# Altium schematic symbol library Regulator.SchLib: 250 symbols (part 3 of 6)
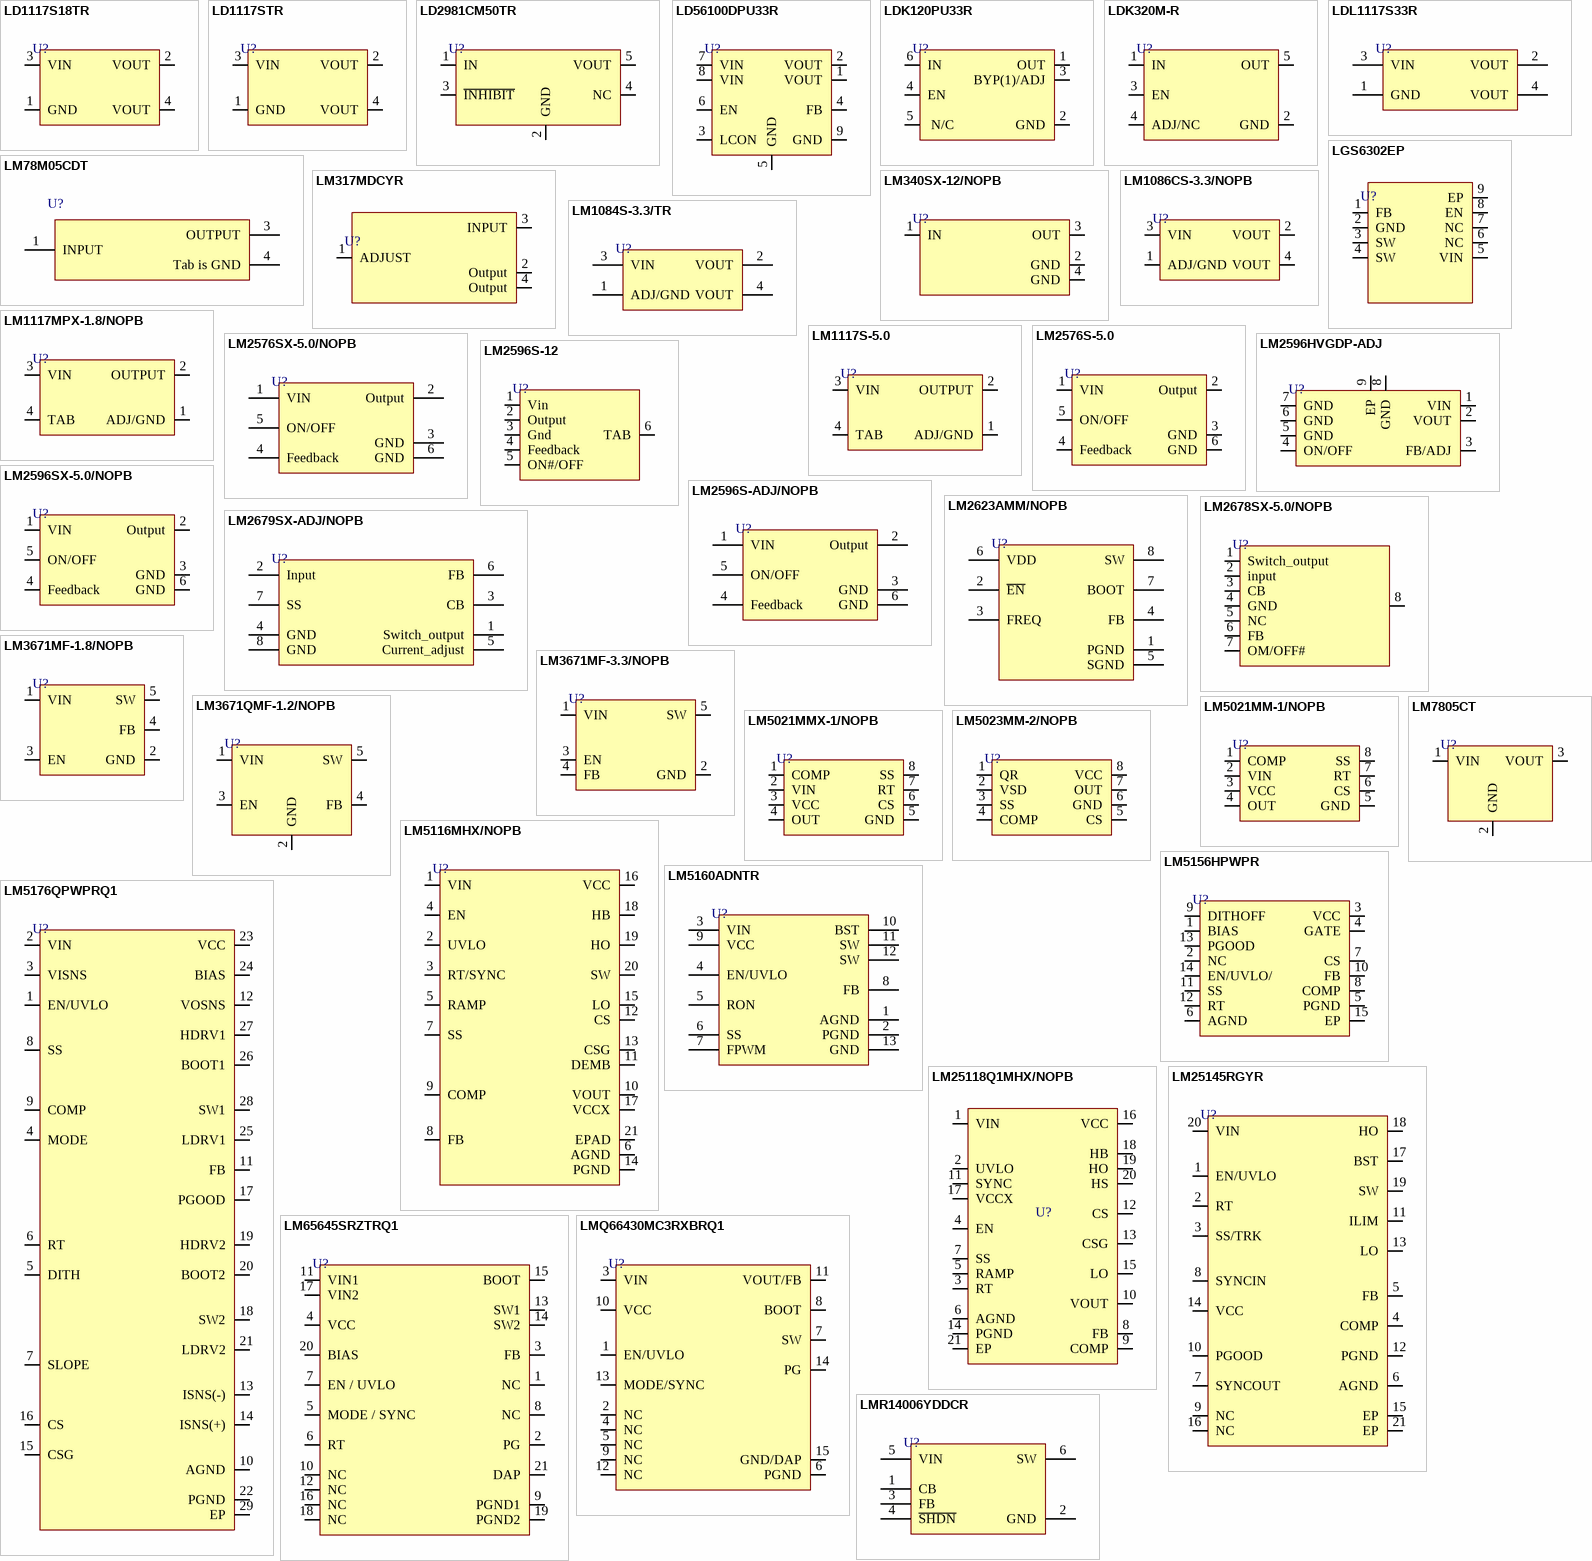
[diagram p8: symbols LD1117S18TR to LMR14006YDDCR]

## LMR14006YDDCR
designator U?
IC REG BUCK ADJ 600MA TSOT23-6; Manufacturer: Texas Instruments; Manufacturer Part Number: LMR14006YDDCR; Number of Outputs: 1; Min Input Voltage: 4V; Max Input Voltage: 40V; Switching Frequency: 2.415MHz; Quiescent Current: 28uA; Output Type: Fixed,Adjustable; Supplier 1: Mouser; RoHS: Yes; Category: Voltage Regulators - Switching; Pricing 1: 1=2.41000, 10=2.18000, 50=2.06000, 100=1.75000, 1000=1.20000, 10000=1.19000 (USD); Mount: Surface Mount; Case/Package: SOT-23-6; Number of Pins: 6; Weight: 0.00127oz; Min Operating Temperature: -40°C; Max Operating Temperature: 125°C; Packaging: Tape and Reel; Max Output Current: 600mA; Output Current: 600mA; Package Quantity: 3000; Operating Supply Voltage: 40V; Radiation Hardening: No; Lead Free: Lead Free; RoHS Compliant: Yes; ComponentLink1URL: https://datasheet.ciiva.com/29899/lmr14006-29899414.pdf?src-supplier=Avnet; ComponentLink1Description: https://datasheet.ciiva.com/29899/lmr14006-29899414.pdf?src-supplier=Avnet; LCSC Part Number: C477919; Item Type: IC; Supplier Part Number 1: 595-LMR14006YDDCR
footprint TSOP-6L
pins: 1 CB, 2 GND, 3 FB, 4 ~{SHDN}, 5 VIN, 6 SW

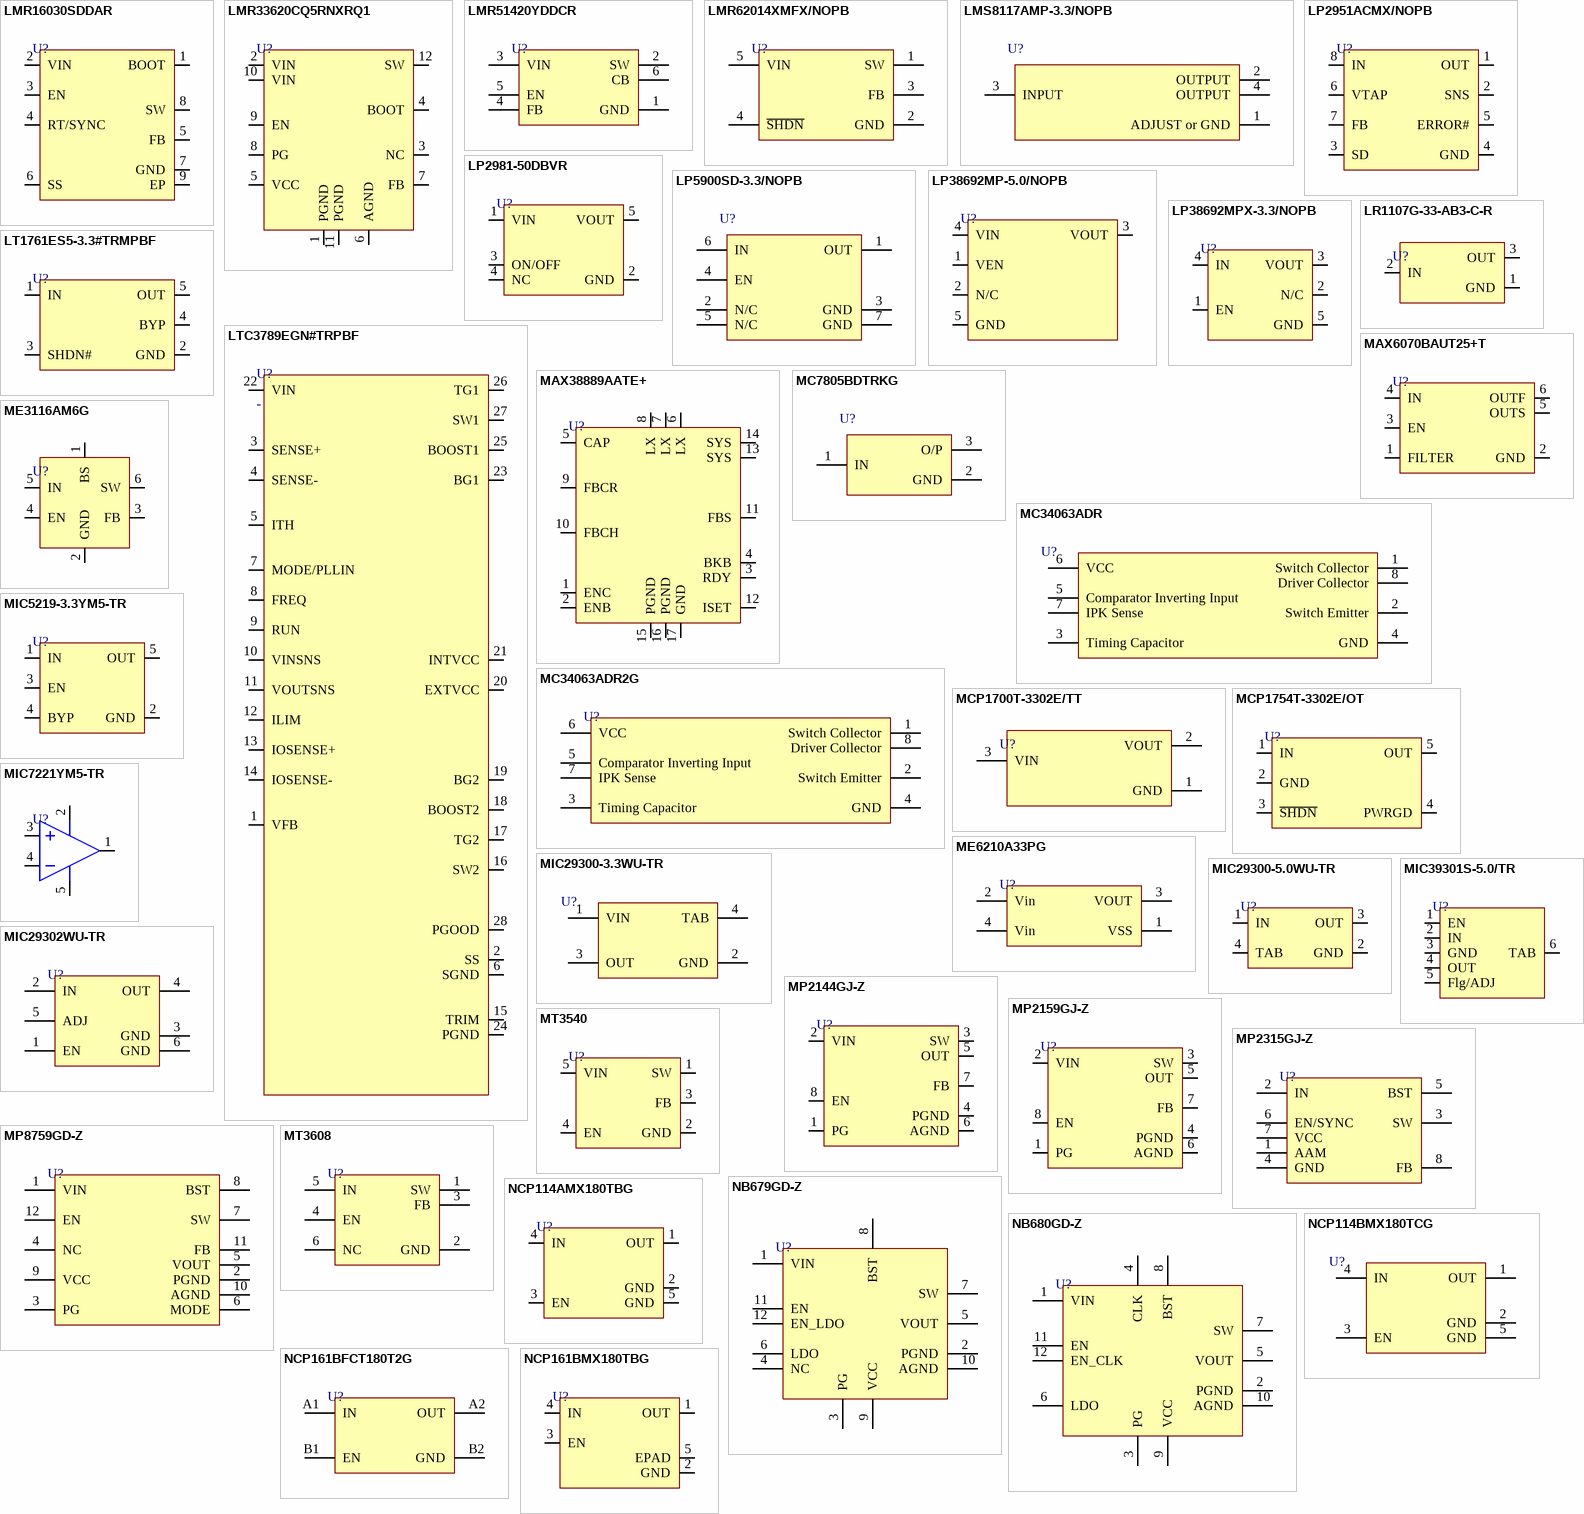
[diagram p2: symbols LMR16030SDDAR to NCP161BMX180TBG]

## LMR16030SDDAR
designator U?
IC REG BUCK ADJUSTABLE 3A 8SOPWR; Manufacturer: Texas Instruments; Manufacturer Part Number: LMR16030SDDAR; Quiescent Current: 40uA; Supplier 1: Digi-Key; RoHS: Yes; Category: Voltage Regulators - Switching; Stock 1: 10434; Pricing 1: 1=4.08000, 10=3.66300, 25=3.46320, 100=3.00130, 250=2.84736, 500=2.55494, 1000=2.17800 (USD); Number of Pins: 8; Min Operating Temperature: -40°C; Max Operating Temperature: 125°C; Lead Free: Lead Free; RoHS Compliant: Yes; ComponentLink1URL: http://www.ti.com/lit/ds/symlink/lmr16030.pdf?src-supplier=Digi-Key; ComponentLink1Description: http://www.ti.com/lit/ds/symlink/lmr16030.pdf?src-supplier=Digi-Key; ComponentLink2URL: http://www.ti.com/general/docs/suppproductinfo.tsp?distId=10&amp;gotoUrl=http%3A%2F%2Fwww.ti.com%2Flit%2Fgpn%2Flmr16030&src-supplier=Digi-Key; ComponentLink2Description: http://www.ti.com/general/docs/suppproductinfo.tsp?distId=10&amp;gotoUrl=http%3A%2F%2Fwww.ti.com%2Flit%2Fgpn%2Flmr16030&src-supplier=Digi-Key; Supplier Part Number 1: 296-47797-1-ND; LCSC Part Number: C136648; Item Type: IC
footprint 8-SO-EP_
pins: 1 BOOT, 2 VIN, 3 EN, 4 RT/SYNC, 5 FB, 6 SS, 7 GND, 8 SW, 9 EP

## LMR33620CQ5RNXRQ1
designator U?
IC REG BUCK 5V 2A 12VQFN; Manufacturer: Texas Instruments; Manufacturer Part Number: LMR33620CQ5RNXRQ1; Supplier: Digikey; Supplier Part Number: 296-53213-1-ND; RoHS: Yes; Category: Voltage Regulators - Switching; Stock: 5909; Pricing: 1=2.41, 10=2.163, 25=2.04, 100=1.7383, 250=1.63216, 500=1.42814, 1000=1.18332 (USD); ComponentLink1URL: http://www.ti.com/general/docs/suppproductinfo.tsp?distId=10&amp;gotoUrl=http%3A%2F%2Fwww.ti.com%2Flit%2Fgpn%2Flmr33620-q1&src-supplier=Digikey; ComponentLink1Description: http://www.ti.com/general/docs/suppproductinfo.tsp?distId=10&amp;gotoUrl=http%3A%2F%2Fwww.ti.com%2Flit%2Fgpn%2Flmr33620-q1&src-supplier=Digikey; Item Type: IC
footprint 12-VQFN-HR (3x2)
pins: 1 PGND, 2 VIN, 3 NC, 4 BOOT, 5 VCC, 6 AGND, 7 FB, 8 PG, 9 EN, 10 VIN, 11 PGND, 12 SW

## LMR51420YDDCR
designator U?
IC REG BUCK ADJ 2A SOT23-THIN; Manufacturer: Texas Instruments; Manufacturer Part Number: LMR51420YDDCR; Supplier 1: Mouser; RoHS: No; Category: Integrated Circuits (ICs); Stock 1: 6752; Pricing 1: 1=1.56, 10=1.41, 50=1.33, 100=1.13, 1000=0.77, 10000=0.769 (USD); LCSC Part Number: C5383002; Item Type: IC; Supplier Part Number 1: 595-LMR51420YDDCR; ComponentLink1Description: LCSC; ComponentLink1URL: https://www.lcsc.com/product-detail/DC-DC-Converters_Texas-Instruments-LMR51420YDDCR_C5383002.html
footprint SOT-23-6 THIN
pins: 1 GND, 2 SW, 3 VIN, 4 FB, 5 EN, 6 CB

## LMR62014XMFX/NOPB
designator U?
IC REG BOOST ADJ 1.8A SOT23-5; Manufacturer: TI National Semiconductor; Manufacturer Part Number: LMR62014XMFX/NOPB; Output Voltage: 20V; Min Input Voltage: 2.7V; Number of Outputs: 1; Max Output current: 1.4A; Max Supply Voltage: 14V; Min Output Voltage: 3V; Switching Frequency: 1.6MHz; Synchronous Rectifier: No; Quiescent Current: 2mA; Output Type: Adjustable; Output Configuration: Positive; Supplier 1: Mouser; RoHS: Yes; Category: Voltage Regulators - Switching; Stock 1: 7014; Pricing 1: 1=0.96000, 10=0.86100, 50=0.81700, 100=0.67100, 1000=0.43800, 10000=0.39800 (USD); Mounting Technology: Surface Mount; Case/Package: SOT-23-5; Pins: 5; Contact Plating: Tin,Matte; Min Operating Temperature: -40°C; Max Operating Temperature: 125°C; Output Current: 1.8A; Packaging: Tape and Reel; Package Quantity: 3000; Max Output Voltage: 20V; Topology: Boost; Series: SIMPLE SWITCHER®; Radiation Hardening: No; Lead Free: Lead Free; RoHS Compliant: Yes; ComponentLink1URL: http://www.ti.com/lit/ds/symlink/lmr62014.pdf?src-supplier=Farnell; ComponentLink1Description: http://www.ti.com/lit/ds/symlink/lmr62014.pdf?src-supplier=Farnell; ComponentLink2URL: http://www.ti.com/lit/ds/symlink/lmr62014.pdf?src-supplier=Digi-Key; ComponentLink2Description: http://www.ti.com/lit/ds/symlink/lmr62014.pdf?src-supplier=Digi-Key; ComponentLink3URL: http://www.ti.com/lit/gpn/lmr62014?src-supplier=Mouser; ComponentLink3Description: http://www.ti.com/lit/gpn/lmr62014?src-supplier=Mouser; ComponentLink4URL: http://www.ti.com/general/docs/lit/getliterature.tsp?genericPartNumber=LMR62014&&fileType=pdf&src-supplier=Avnet; ComponentLink4Description: http://www.ti.com/general/docs/lit/getliterature.tsp?genericPartNumber=LMR62014&&fileType=pdf&src-supplier=Avnet; ComponentLink5URL: http://components.arrow.com/part/dataview/56704644S382285N1317?src-supplier=Arrow+Electronics; ComponentLink5Description: http://components.arrow.com/part/dataview/56704644S382285N1317?src-supplier=Arrow+Electronics; Supplier Part Number 1: 926-LMR62014XMFXNOPB; LCSC Part Number: C468235; Item Type: IC
footprint SOT-23-5
pins: 1 SW, 2 GND, 3 FB, 4 ~{SHDN} , 5 VIN

## LMS8117AMP-3.3/NOPB
designator U?
IC REG LINEAR 3.3V 1A SOT223; Manufacturer: Texas Instruments; Manufacturer Part Number: LMS8117AMP-3.3/NOPB; Number of Outputs: 1; Min Input Voltage: 2.5V; Max Input Voltage: 15V; Polarity: Positive; Quiescent Current: 10mA; Accuracy: 1%; Output Type: Fixed; Dropout Voltage: 1.2V; Nominal Supply Current: 5mA; Supplier 1: Arrow Electronics; RoHS: Yes; Category: Voltage Regulators - Linear; Stock 1: 843; Pricing 1: 1=1.18760, 10=1.01800, 100=0.77540, 250=0.68460, 500=0.64870, 1000=0.59270 (USD); Mount: Surface Mount; Case/Package: SOT-223; Number of Pins: 4; Contact Plating: Tin,Matte; Min Operating Temperature: 0°C; Max Operating Temperature: 125°C; Output Voltage: 3.3V; Max Output Current: 1A; Packaging: Tape and Reel; Output Current: 1A; Nominal Output Voltage: 3.3V; Output Voltage Accuracy: 1%; Current Rating: 1A; Package Quantity: 1000; Length: 6.5mm; Width: 3.56mm; Height: 1.6mm; Radiation Hardening: No; REACH SVHC: No SVHC; Lead Free: Lead Free; RoHS Compliant: Yes; Supplier Part Number 1: LMS8117AMP-3.3/NOPB; LCSC Part Number: C201952; Item Type: IC; ComponentLink11Description: LCSC; ComponentLink11URL: https://www.lcsc.com/product-detail/Linear-Voltage-Regulators-LDO_Texas-Instruments-LMS8117AMP-3-3-NOPB_C201952.html
footprint SOT- 223
pins: 1 ADJUST or GND, 2 OUTPUT, 3 INPUT, 4 OUTPUT

## LP2951ACMX/NOPB
designator U?
IC REG LIN POS ADJ 100MA 8SOIC; Manufacturer: TI National Semiconductor; Manufacturer Part Number: LP2951ACMX/NOPB; Quiescent Current: 75uA; Max Supply Voltage: 30V; Min Supply Voltage: 2.3V; Supplier: Mouser; LCSC Part Number: C67596; RoHS: Yes; Item Type: IC; Stock: 19390; Pricing: 1=0.89, 10=0.732, 50=0.732, 100=0.542, 1000=0.369, 10000=0.308 (USD); Nominal Supply Current: 75uA; Length: 4.9mm; Width: 3.91mm; Height: 1.75mm; Thickness: 1.58mm; ComponentLink1URL: https://datasheet.ciiva.com/27052/1323645-27052000.pdf?src-supplier=Jameco; ComponentLink1Description: https://datasheet.ciiva.com/27052/1323645-27052000.pdf?src-supplier=Jameco; ComponentLink2URL: https://datasheet.ciiva.com/41458/001014279-da-01-en-ic-reg-ldo-ad-lp2951acmx-nopb-soic-8-tid-41458660.pdf?src-supplier=Conrad; ComponentLink2Description: https://datasheet.ciiva.com/41458/001014279-da-01-en-ic-reg-ldo-ad-lp2951acmx-nopb-soic-8-tid-41458660.pdf?src-supplier=Conrad; ComponentLink3URL: https://datasheet.ciiva.com/3223/lp2950-n-3223829.pdf?src-supplier=Avnet; ComponentLink3Description: https://datasheet.ciiva.com/3223/lp2950-n-3223829.pdf?src-supplier=Avnet; ComponentLink4URL: https://datasheet.ciiva.com/3223/lp2950-n-3223830.pdf?src-supplier=Avnet; ComponentLink4Description: https://datasheet.ciiva.com/3223/lp2950-n-3223830.pdf?src-supplier=Avnet; ComponentLink5URL: https://datasheet.ciiva.com/4886/lp2950-n-4886917.pdf?src-supplier=Mouser; ComponentLink5Description: https://datasheet.ciiva.com/4886/lp2950-n-4886917.pdf?src-supplier=Mouser; ComponentLink6URL: https://datasheet.ciiva.com/6597/lp2950-n-6597112.pdf?src-supplier=Digikey; ComponentLink6Description: https://datasheet.ciiva.com/6597/lp2950-n-6597112.pdf?src-supplier=Digikey; ComponentLink7URL: https://datasheet.ciiva.com/6597/lp2950-n-6597113.pdf?src-supplier=Digikey; ComponentLink7Description: https://datasheet.ciiva.com/6597/lp2950-n-6597113.pdf?src-supplier=Digikey; ComponentLink8URL: https://datasheet.ciiva.com/6597/lp2950-n-6597114.pdf?src-supplier=Digikey; ComponentLink8Description: https://datasheet.ciiva.com/6597/lp2950-n-6597114.pdf?src-supplier=Digikey
footprint SOIC-8
pins: 1 OUT, 2 SNS, 3 SD, 4 GND, 5 ERROR#, 6 VTAP, 7 FB, 8 IN

## LP2981-50DBVR
designator U?
IC REG LINEAR 5V 100MA SOT23-5; Manufacturer: Texas Instruments; Manufacturer Part Number: LP2981-50DBVR; Supplier: Mouser; LCSC Part Number: C2877856; RoHS: Yes; Item Type: IC; Stock: 14435; Pricing: 1=0.34, 10=0.274, 50=0.274, 100=0.203, 1000=0.138, 10000=0.137 (USD); ComponentLink1URL: https://datasheet.ciiva.com/2042/lp2981a-50-2042256.pdf?src-supplier=Digikey; ComponentLink1Description: https://datasheet.ciiva.com/2042/lp2981a-50-2042256.pdf?src-supplier=Digikey; ComponentLink2URL: https://datasheet.ciiva.com/41458/001014295-da-01-en-ic-reg-ldo-5v-0-lp2981-50dbvr-sot-5-tid-41458697.pdf?src-supplier=Conrad; ComponentLink2Description: https://datasheet.ciiva.com/41458/001014295-da-01-en-ic-reg-ldo-5v-0-lp2981-50dbvr-sot-5-tid-41458697.pdf?src-supplier=Conrad; ComponentLink3URL: https://datasheet.ciiva.com/3223/lp2981a-33-3223861.pdf?src-supplier=Avnet; ComponentLink3Description: https://datasheet.ciiva.com/3223/lp2981a-33-3223861.pdf?src-supplier=Avnet; ComponentLink4URL: https://datasheet.ciiva.com/2042/lp2981a-50-2042254.pdf?src-supplier=Digikey; ComponentLink4Description: https://datasheet.ciiva.com/2042/lp2981a-50-2042254.pdf?src-supplier=Digikey; ComponentLink5URL: https://datasheet.ciiva.com/2042/lp2981a-50-2042255.pdf?src-supplier=Digikey; ComponentLink5Description: https://datasheet.ciiva.com/2042/lp2981a-50-2042255.pdf?src-supplier=Digikey
footprint SOT-23-5
pins: 1 VIN, 2 GND, 3 ON/OFF, 4 NC, 5 VOUT

## LP5900SD-3.3/NOPB
designator U?
IC REG LINEAR 3.3V 150MA 6WSON; Manufacturer: Texas Instruments; Manufacturer Part Number: LP5900SD-3.3/NOPB; Package: WSON-6-EP(2x2); LCSC Part Number: C131975; Item Type: IC; ComponentLink1Description: LCSC; ComponentLink1URL: https://www.lcsc.com/product-detail/Linear-Voltage-Regulators-LDO_Texas-Instruments-LP5900SD-3-3-NOPB_C131975.html
footprint 6-WSON (2.2x2.5)
pins: 1 OUT, 2 N/C, 3 GND, 4 EN, 5 N/C, 6 IN, 7 GND

## LP38692MP-5.0/NOPB
designator U?
IC REG LINEAR 5V 1A SOT223-5; Manufacturer: Texas Instruments; Manufacturer Part Number: LP38692MP-5.0/NOPB; Item Type: LDO; Supplier: Mouser; Supplier Part Number: 926-38692MP-5.0/NOPB; RoHS: Yes; Stock: 1461; Pricing: 1=2.01, 10=1.71, 50=1.71, 100=1.45, 1000=0.91, 10000=0.888 (USD); Thickness: 1.6mm; ComponentLink1URL: https://datasheet.ciiva.com/6596/lp38690-6596184.pdf?src-supplier=Digikey; ComponentLink1Description: https://datasheet.ciiva.com/6596/lp38690-6596184.pdf?src-supplier=Digikey; ComponentLink2URL: https://datasheet.ciiva.com/6596/lp38690-6596185.pdf?src-supplier=Digikey; ComponentLink2Description: https://datasheet.ciiva.com/6596/lp38690-6596185.pdf?src-supplier=Digikey; ComponentLink3URL: https://datasheet.ciiva.com/6596/lp38690-6596186.pdf?src-supplier=Digikey; ComponentLink3Description: https://datasheet.ciiva.com/6596/lp38690-6596186.pdf?src-supplier=Digikey; ComponentLink4URL: https://datasheet.ciiva.com/14278/lp38692-14278796.pdf?src-supplier=Avnet; ComponentLink4Description: https://datasheet.ciiva.com/14278/lp38692-14278796.pdf?src-supplier=Avnet; ComponentLink5URL: https://datasheet.ciiva.com/22704/1854710-22704677.pdf?src-supplier=Element14; ComponentLink5Description: https://datasheet.ciiva.com/22704/1854710-22704677.pdf?src-supplier=Element14; LCSC Part Number: C28191
footprint SOT-223-5
pins: 1 VEN, 2 N/C, 3 VOUT, 4 VIN, 5 GND

## LP38692MPX-3.3/NOPB
designator U?
IC REG LINEAR 3.3V 1A SOT223-5; Manufacturer: TI National Semiconductor; Manufacturer Part Number: LP38692MPX-3.3/NOPB; Max Supply Voltage: 10V; Dropout Voltage: 650mV; Number of Regulators: 1; Quiescent Current: 55uA; Output Type: Fixed; Output Configuration: Positive; Max Supply Current: 100uA; Power Supply Rejection Ratio (PSRR): 55dB; Supplier: Mouser; Supplier Part Number: 926-LP38692MPX33NOPB; RoHS: Yes; Item Type: IC; Stock: 1537; Pricing: 1=1.46, 10=1.12, 50=1.12, 100=0.99, 1000=0.795, 10000=0.736 (USD); Mounting Technology: Surface Mount; Case/Package: TO-261-5; Pins: 5; Min Operating Temperature: -40°C; Max Operating Temperature: 125°C; Output Voltage: 3.3V; Output Current: 1A; Packaging: Cut Tape; Series: -; Min Output Voltage: 3.3V; Lead Free: Lead Free; RoHS Compliant: Yes; ComponentLink1URL: https://datasheet.ciiva.com/6583/lp38690-6583575.pdf?src-supplier=Digikey; ComponentLink1Description: https://datasheet.ciiva.com/6583/lp38690-6583575.pdf?src-supplier=Digikey
footprint SOT-223-5
pins: 1 EN, 2 N/C, 3 VOUT, 4 IN, 5 GND

## LR1107G-33-AB3-C-R
designator U?
600mA 60dB Fixed 3.3V Positive electrode 7V SOT-89-3 Voltage Regulators - Linear, Low Drop Out (LDO) Regulators ROHS; Manufacturer: UTC; Manufacturer Part Number: LR1107G-33-AB3-C-R; Item Type: IC; Package: SOT-89-3; LCSC Part Number: C171498; ComponentLink1Description: LCSC; ComponentLink1URL: https://www.lcsc.com/product-detail/Linear-Voltage-Regulators-LDO_UTC-Unisonic-Tech-LR1107G-33-AB3-C-R_C171498.html
footprint SOT-89-3
pins: 1 GND, 2 IN, 3 OUT

## LT1761ES5-3.3#TRMPBF
designator U?
IC REG LDO 3.3V 0.1A TSOT23-5; Manufacturer: Analog Devices / Linear Technology; Manufacturer Part Number: LT1761ES5-3.3#TRMPBF; Number of Channels: 1NUMBER; Supplier: Mouser; LCSC Part Number: C655159; RoHS: Yes; Item Type: IC; Stock: 4291; Pricing: 1=4.03, 10=2.79, 50=2.79, 100=2.32, 1000=1.77, 10000=1.67 (USD); ComponentLink1URL: https://datasheet.ciiva.com/29306/157633-da-01-en-ic-lt-1761-es5-3-3-l-d-reg-sot-23-5-29306613.pdf?src-supplier=Conrad; ComponentLink1Description: https://datasheet.ciiva.com/29306/157633-da-01-en-ic-lt-1761-es5-3-3-l-d-reg-sot-23-5-29306613.pdf?src-supplier=Conrad; ComponentLink2URL: https://datasheet.ciiva.com/2041/2732-2041141.pdf?src-supplier=Digikey; ComponentLink2Description: https://datasheet.ciiva.com/2041/2732-2041141.pdf?src-supplier=Digikey; ComponentLink3URL: https://datasheet.ciiva.com/2041/2732-2041142.pdf?src-supplier=Digikey; ComponentLink3Description: https://datasheet.ciiva.com/2041/2732-2041142.pdf?src-supplier=Digikey; ComponentLink4URL: https://datasheet.ciiva.com/2041/2732-2041143.pdf?src-supplier=Digikey; ComponentLink4Description: https://datasheet.ciiva.com/2041/2732-2041143.pdf?src-supplier=Digikey; ComponentLink5URL: https://datasheet.ciiva.com/8041/1563033-8041753.pdf?src-supplier=Element14; ComponentLink5Description: https://datasheet.ciiva.com/8041/1563033-8041753.pdf?src-supplier=Element14
footprint TSOT-23-5
pins: 1 IN, 2 GND, 3 SHDN#, 4 BYP, 5 OUT

## LTC3789EGN#TRPBF
designator U?, comment -
IC REG CTRLR BUCK-BOOST 28SSOP; Manufacturer: Analog Devices / Linear Technology; Manufacturer Part Number: LTC3789EGN#TRPBF; Supplier: Mouser; Supplier Part Number: 584-LTC3789EGN#TRPBF; RoHS: Yes; Category: Voltage Regulators - Switching; Stock: 782; Pricing: 1=11.87, 10=10.91, 50=10.46, 100=9.21, 1000=7.52, 10000=7.23 (USD); ComponentLink1URL: https://datasheet.ciiva.com/2019/30095-2019043.pdf?src-supplier=Digikey; ComponentLink1Description: https://datasheet.ciiva.com/2019/30095-2019043.pdf?src-supplier=Digikey; Item Type: IC
footprint 28-SSOP
pins: 1 VFB, 2 SS, 3 SENSE+, 4 SENSE-, 5 ITH, 6 SGND, 7 MODE/PLLIN, 8 FREQ, 9 RUN, 10 VINSNS, 11 VOUTSNS, 12 ILIM, 13 IOSENSE+, 14 IOSENSE-, 15 TRIM, 16 SW2, 17 TG2, 18 BOOST2, 19 BG2, 20 EXTVCC, 21 INTVCC, 22 VIN, 23 BG1, 24 PGND, 25 BOOST1, 26 TG1, 27 SW1, 28 PGOOD

## MAX6070BAUT25+T
designator U?
IC VREF SERIES 0.08% SOT23-6; Manufacturer: Analog Devices; Manufacturer Part Number: MAX6070BAUT25+T; Output Type: 6317OutputType; Reference Type: 6142ReferenceType; Max Supply Voltage: 5.5V; Max Output current: 10mA; Min Input Voltage: 2.7V; Min Output Voltage: 2.5V; Number of Channels: 1NUMBER; Operating Supply Current: 300uA; Quiescent Current: 235uA; Supplier: Mouser; LCSC Part Number: C143531; RoHS: No; Item Type: IC; Stock: 5392; Pricing: 1=3.56, 10=2.63, 50=2.63, 100=2.19, 1000=1.72, 10000=1.53 (USD); Mounting Technology: 8Mount; Case/Package: 942Case; Pins: 6NUMBER; Min Operating Temperature: -40°C; Max Operating Temperature: 125°C; Tolerance: 0.08%; Output Current: 10mA; Output Voltage: 2.5V; Radiation Hardening: 5898YesNo; ComponentLink1URL: https://datasheet.octopart.com/MAX6070BAUT25%2BT-Analog-Devices-datasheet-134530559.pdf?src-supplier=LKR; ComponentLink1Description: https://datasheet.octopart.com/MAX6070BAUT25%2BT-Analog-Devices-datasheet-134530559.pdf?src-supplier=LKR
footprint SOT-23-6
pins: 1 FILTER, 2 GND, 3 EN, 4 IN, 5 OUTS, 6 OUTF

## MAX38889AATE+
designator U?
IC REG BUCK-BOOST ADJ 3A 16TQFN; Manufacturer: Analog Devices; Manufacturer Part Number: MAX38889AATE+; Supplier: Mouser; Supplier Part Number: 700-MAX38889AATE+; RoHS: No; Category: Voltage Regulators - Switching; Stock: 2896; Pricing: 1=6.25, 10=5.65, 50=4.68, 100=4.47, 1000=3.7, 10000=3.7 (USD); Item Type: IC
footprint 16-QFN (3x3).
pins: 1 ENC, 2 ENB, 3 RDY, 4 BKB, 5 CAP, 6 LX, 7 LX, 8 LX, 9 FBCR, 10 FBCH, 11 FBS, 12 ISET, 13 SYS, 14 SYS, 15 PGND, 16 PGND, 17 GND

## MC7805BDTRKG
designator U?
IC REG LINEAR 5V 1A DPAK; Manufacturer: onsemi; Manufacturer Part Number: MC7805BDTRKG; Item Type: Regulator; Package: TO-252-2(DPAK); LCSC Part Number: C110908; ComponentLink1Description: LCSC; ComponentLink1URL: https://www.lcsc.com/product-detail/Linear-Voltage-Regulators-LDO_onsemi-MC7805BDTRKG_C110908.html
footprint DPAK_
pins: 1 IN, 2 GND, 3 O/P

## MC34063ADR
designator U?
IC REG BUCK BST ADJ 1.5A 8SOIC; Manufacturer: Texas Instruments; Manufacturer Part Number: MC34063ADR; Output Voltage: 40V; Number of Outputs: 1; Switching Frequency: 100kHz; Synchronous Rectifier: No; Output Type: Adjustable; Max Output Current: 750mA; Min Input Voltage: 3V; Min Output Voltage: 1.55V; Quiescent Current: 4mA; Topology: Flyback,SEPIC; Supplier 1: Digi-Key; RoHS: Yes; Category: Power Supply Modules; Stock 1: 17204; Pricing 1: 1=0.78000, 10=0.68400, 25=0.64240, 100=0.52420, 250=0.48688, 500=0.41438, 1000=0.34206 (USD); Case/Package: D; Number of Pins: 8; Weight: 0.002561oz; Contact Plating: Gold; Min Operating Temperature: 0°C; Max Operating Temperature: 70°C; Output Current: 1.5A; Packaging: Tape and Reel; Package Quantity: 1; Max Input Voltage: 40V; Max Output Voltage: 40V; Termination: SMD/SMT; Radiation Hardening: No; RoHS Compliant: Yes; Lead Free: Lead Free; REACH SVHC: No SVHC; ComponentLink1URL: https://datasheet.ciiva.com/7408/1862376-7408060.pdf?src-supplier=Newark; ComponentLink1Description: https://datasheet.ciiva.com/7408/1862376-7408060.pdf?src-supplier=Newark; ComponentLink2URL: https://datasheet.ciiva.com/2025/mc33063a-2025162.pdf?src-supplier=Digi-Key; ComponentLink2Description: https://datasheet.ciiva.com/2025/mc33063a-2025162.pdf?src-supplier=Digi-Key; ComponentLink3URL: https://datasheet.ciiva.com/2025/mc33063a-2025161.pdf?src-supplier=Digi-Key; ComponentLink3Description: https://datasheet.ciiva.com/2025/mc33063a-2025161.pdf?src-supplier=Digi-Key; ComponentLink4URL: https://datasheet.ciiva.com/2025/mc33063a-2025163.pdf?src-supplier=Digi-Key; ComponentLink4Description: https://datasheet.ciiva.com/2025/mc33063a-2025163.pdf?src-supplier=Digi-Key; Supplier Part Number 1: 296-17765-1-ND; LCSC Part Number: C100023; Item Type: IC
footprint SOIC-8
pins: 1 Switch Collector, 2 Switch Emitter, 3 Timing Capacitor, 4 GND, 5 Comparator Inverting Input, 6 VCC, 7 IPK Sense, 8 Driver Collector

## MC34063ADR2G
designator U?
IC REG BUCK BOOST INV ADJ 8SOIC; Manufacturer: ON Semiconductor; Manufacturer Part Number: MC34063ADR2G; Number of Outputs: 1; Output Voltage: 40V; Max Output Current: 1.5A; Min Input Voltage: 3V; Switching Frequency: 100kHz; Synchronous Rectifier: No; Min Output Voltage: 1.25V; Output Type: Adjustable; Supplier 1: Arrow Electronics; RoHS: Yes; Category: Voltage Regulators - Switching; Stock 1: 2000; Pricing 1: 1=0.59300, 10=0.47930, 25=0.47460, 100=0.29030, 250=0.28740, 500=0.28460, 1000=0.25300, 3000=0.22150 (USD); Mount: Surface Mount; Case/Package: SOIC; Number of Pins: 8; Contact Plating: Tin,Matte; Min Operating Temperature: 0°C; Max Operating Temperature: 70°C; Package Quantity: 1; Packaging: Tape and Reel; Output Current: 1.5A; Max Input Voltage: 40V; Max Output Voltage: 40V; Series: -; Switching Frequency-Max: 100kHz; Length: 5mm; Width: 4mm; Height: 1.5mm; Radiation Hardening: No; REACH SVHC: No SVHC; Lead Free: Lead Free; Halogen Free: Halogen Free; RoHS Compliant: Yes; ComponentLink1URL: https://datasheet.ciiva.com/34301/871666-34301629.pdf?src-supplier=Jameco; ComponentLink1Description: https://datasheet.ciiva.com/34301/871666-34301629.pdf?src-supplier=Jameco; ComponentLink2URL: https://datasheet.ciiva.com/15112/getdatasheetpartid-59933-15112667.pdf?src-supplier=Verical; ComponentLink2Description: https://datasheet.ciiva.com/15112/getdatasheetpartid-59933-15112667.pdf?src-supplier=Verical; ComponentLink3URL: https://datasheet.ciiva.com/2025/mc34063a-d-2025168.pdf?src-supplier=Digi-Key; ComponentLink3Description: https://datasheet.ciiva.com/2025/mc34063a-d-2025168.pdf?src-supplier=Digi-Key; ComponentLink4URL: https://datasheet.ciiva.com/3217/mc34063a-d-3217624.pdf?src-supplier=Avnet; ComponentLink4Description: https://datasheet.ciiva.com/3217/mc34063a-d-3217624.pdf?src-supplier=Avnet; ComponentLink5URL: https://datasheet.ciiva.com/3217/mc34063a-d-3217493.pdf?src-supplier=Avnet; ComponentLink5Description: https://datasheet.ciiva.com/3217/mc34063a-d-3217493.pdf?src-supplier=Avnet; ComponentLink6URL: https://datasheet.ciiva.com/2025/mc34063a-d-2025169.pdf?src-supplier=Digi-Key; ComponentLink6Description: https://datasheet.ciiva.com/2025/mc34063a-d-2025169.pdf?src-supplier=Digi-Key; ComponentLink7URL: https://datasheet.ciiva.com/2025/mc34063a-d-2025167.pdf?src-supplier=Digi-Key; ComponentLink7Description: https://datasheet.ciiva.com/2025/mc34063a-d-2025167.pdf?src-supplier=Digi-Key; Supplier Part Number 1: MC34063ADR2G; Item Type: IC
footprint SOIC-8
pins: 1 Switch Collector, 2 Switch Emitter, 3 Timing Capacitor, 4 GND, 5 Comparator Inverting Input, 6 VCC, 7 IPK Sense, 8 Driver Collector

## MCP1700T-3302E/TT
designator U?
IC REG LDO 3.3V 0.25A SOT23-3; Manufacturer: Microchip; Manufacturer Part Number: MCP1700T-3302E/TT; Number of Outputs: 1; Min Input Voltage: 2.3V; Max Input Voltage: 6V; Dropout Voltage: 178mV; Output Current: 250mA; Max Power Dissipation: 369.6mW; Input Bias Current: 1.6uA; Polarity: Positive; Quiescent Current: 4uA; Accuracy: 2%; Output Type: Fixed; Supplier 1: Digi-Key; RoHS: Yes; Category: Voltage Regulators - Linear; Stock 1: 230029; Pricing 1: 1=0.50000, 25=0.42400, 100=0.37500 (USD); Mount: Surface Mount; Case/Package: SOT-23; Number of Pins: 3; Contact Plating: Tin,Matte; Min Operating Temperature: -40°C; Max Operating Temperature: 125°C; Nominal Output Voltage: 3.3V; Packaging: Tape and Reel; Output Voltage: 3.3V; Max Output Current: 250mA; Max Supply Voltage: 6V; Min Supply Voltage: 2.3V; Package Quantity: 3000; Min Output Voltage: 3.3V; Max Output Voltage: 3.3V; Termination: SMD/SMT; Output Voltage Accuracy: 2%; Nominal Supply Current: 4uA; Power Dissipation: 369.6mW; Supply Current: 4uA; Length: 2.9mm; Width: 1.3mm; Height: 0.95mm; Radiation Hardening: No; Reach SVHC Compliant: No SVHC; Lead Free: Lead Free; RoHS Compliant: Yes; ComponentLink1URL: https://datasheet.ciiva.com/5801/1784514-5801824.pdf?src-supplier=Farnell; ComponentLink1Description: https://datasheet.ciiva.com/5801/1784514-5801824.pdf?src-supplier=Farnell; ComponentLink2URL: https://datasheet.ciiva.com/2040/21826b-2040112.pdf?src-supplier=Digi-Key; ComponentLink2Description: https://datasheet.ciiva.com/2040/21826b-2040112.pdf?src-supplier=Digi-Key; ComponentLink3URL: https://datasheet.ciiva.com/7649/1784514-7649813.pdf?src-supplier=Element14; ComponentLink3Description: https://datasheet.ciiva.com/7649/1784514-7649813.pdf?src-supplier=Element14; ComponentLink4URL: https://datasheet.ciiva.com/22710/1784514-22710988.pdf?src-supplier=Element14; ComponentLink4Description: https://datasheet.ciiva.com/22710/1784514-22710988.pdf?src-supplier=Element14; ComponentLink5URL: https://datasheet.ciiva.com/14150/mcp1700-eng-tds-14150122.pdf?src-supplier=Distrelec; ComponentLink5Description: https://datasheet.ciiva.com/14150/mcp1700-eng-tds-14150122.pdf?src-supplier=Distrelec; ComponentLink6URL: https://datasheet.ciiva.com/8041/1784514-8041598.pdf?src-supplier=Element14; ComponentLink6Description: https://datasheet.ciiva.com/8041/1784514-8041598.pdf?src-supplier=Element14; ComponentLink7URL: https://datasheet.ciiva.com/3224/jp011779-3224133.pdf?src-supplier=Avnet; ComponentLink7Description: https://datasheet.ciiva.com/3224/jp011779-3224133.pdf?src-supplier=Avnet; ComponentLink8URL: https://datasheet.ciiva.com/16208/filehandler-aspxddocname-en011779-16208911.pdf?src-supplier=Future+Electronics; ComponentLink8Description: https://datasheet.ciiva.com/16208/filehandler-aspxddocname-en011779-16208911.pdf?src-supplier=Future+Electronics; ComponentLink9URL: https://datasheet.ciiva.com/15200/getdatasheetpartid-453599-15200229.pdf?src-supplier=Verical; ComponentLink9Description: https://datasheet.ciiva.com/15200/getdatasheetpartid-453599-15200229.pdf?src-supplier=Verical; ComponentLink10URL: https://datasheet.ciiva.com/2040/21826b-2040113.pdf?src-supplier=Digi-Key; ComponentLink10Description: https://datasheet.ciiva.com/2040/21826b-2040113.pdf?src-supplier=Digi-Key; ComponentLink11URL: https://datasheet.ciiva.com/2040/21826b-2040114.pdf?src-supplier=Digi-Key; ComponentLink11Description: https://datasheet.ciiva.com/2040/21826b-2040114.pdf?src-supplier=Digi-Key; ComponentLink12URL: https://datasheet.ciiva.com/29305/651414-da-01-en-ic-reg-ld-mcp1700t-3302e-tt-sot-23-3-mcp-29305258.pdf?src-supplier=Conrad; ComponentLink12Description: https://datasheet.ciiva.com/29305/651414-da-01-en-ic-reg-ld-mcp1700t-3302e-tt-sot-23-3-mcp-29305258.pdf?src-supplier=Conrad; Supplier Part Number 1: MCP1700T3302ETTCT-ND; Item Type: IC
footprint SOT-23 (TRANS NPN 40V 0.6A SOT23)
pins: 1 GND, 2 VOUT, 3 VIN

## MCP1754T-3302E/OT
designator U?
IC REG LINEAR 3.3V 150MA SOT23-5; Manufacturer: Microchip; Manufacturer Part Number: MCP1754T-3302E/OT; Max Supply Voltage: 16V; Number of Regulators: 1; Quiescent Current: 90uA; Output Type: Fixed; Output Configuration: Positive; Max Supply Current: 250uA; Power Supply Rejection Ratio (PSRR): 72dB; Dropout Voltage: 300mV; Min Input Voltage: 3.6V; Accuracy: 2%; Supplier: Arrow Electronics; LCSC Part Number: C295712; RoHS: Yes; Item Type: IC; Stock: 5987; Pricing: 1=0.5022, 10=0.4946, 25=0.487, 100=0.4793, 250=0.4717, 500=0.4641, 1000=0.4565, 3000=0.4488 (USD); Case/Package: SOT-23-5; Pins: 5; Min Operating Temperature: -40°C; Max Operating Temperature: 150°C; Packaging: Tape and Reel; Output Current: 150mA; Series: -; Min Output Voltage: 3.3V; Output Voltage: 3.3V; Number of Outputs: 1; Max Output current: 150mA; Polarity: Positive; Radiation Hardening: No; Lead Free: Lead Free; RoHS Compliant: Yes; ComponentLink1URL: https://datasheet.ciiva.com/26947/getdatasheetpartid-769851-26947956.pdf?src-supplier=Verical; ComponentLink1Description: https://datasheet.ciiva.com/26947/getdatasheetpartid-769851-26947956.pdf?src-supplier=Verical; ComponentLink2URL: https://datasheet.ciiva.com/13012/22276a-79238-13012583.pdf?src-supplier=Mouser; ComponentLink2Description: https://datasheet.ciiva.com/13012/22276a-79238-13012583.pdf?src-supplier=Mouser; ComponentLink3URL: https://datasheet.ciiva.com/8238/22276a-8238678.pdf?src-supplier=Avnet; ComponentLink3Description: https://datasheet.ciiva.com/8238/22276a-8238678.pdf?src-supplier=Avnet; ComponentLink4URL: https://datasheet.ciiva.com/2056/22276a-2056672.pdf?src-supplier=Digikey; ComponentLink4Description: https://datasheet.ciiva.com/2056/22276a-2056672.pdf?src-supplier=Digikey
footprint SOT-23-5
pins: 1 IN, 2 GND, 3 ~{SHDN}, 4 PWRGD, 5 OUT

## ME3116AM6G
designator U?
Step-down type SOT-23-6 DC-DC Converters ROHS; Manufacturer: MICRONE; Manufacturer Part Number: ME3116AM6G; Item Type: IC; Package: SOT-23-6; LCSC Part Number: C97643; ComponentLink1Description: LCSC; ComponentLink1URL: https://www.lcsc.com/product-detail/DC-DC-Converters_MICRONE-Nanjing-Micro-One-Elec-ME3116AM6G_C97643.html
footprint SOT-23-6
pins: 1 BS, 2 GND, 3 FB, 4 EN, 5 IN, 6 SW

## ME6210A33PG
designator U?
500mA 260mV@(200mA) Fixed 3.3V~3.3V Positive 1 18V SOT-89 Linear Voltage Regulators (LDO) ROHS; Manufacturer: MICRONE; Manufacturer Part Number: ME6210A33PG; Item Type: IC; Package: SOT-89; LCSC Part Number: C85233; ComponentLink1Description: LCSC; ComponentLink1URL: https://www.lcsc.com/product-detail/Linear-Voltage-Regulators-LDO_MICRONE-Nanjing-Micro-One-Elec-ME6210A33PG_C85233.html
footprint SOT-89
pins: 1 VSS, 2 Vin, 3 VOUT, 4 Vin

## MIC5219-3.3YM5-TR
designator U?
IC REG LINEAR 3.3V 500MA SOT23-5; Manufacturer: Microchip; Manufacturer Part Number: MIC5219-3.3YM5-TR; Max Supply Voltage: 12V; Min Supply Voltage: 2.5V; Number of Channels: 1NUMBER; Supplier: Digikey; LCSC Part Number: C29613; RoHS: Yes; Item Type: IC; Stock: 92321; Pricing: 1=1.19, 25=1, 100=0.9 (USD); Lead Free: 5697LeadFree; ComponentLink1URL: https://datasheet.ciiva.com/15111/getdatasheetpartid-82344-15111461.pdf?src-supplier=Verical; ComponentLink1Description: https://datasheet.ciiva.com/15111/getdatasheetpartid-82344-15111461.pdf?src-supplier=Verical; ComponentLink2URL: https://datasheet.ciiva.com/16208/mic5219-16208920.pdf?src-supplier=Future+Electronics; ComponentLink2Description: https://datasheet.ciiva.com/16208/mic5219-16208920.pdf?src-supplier=Future+Electronics
footprint SOT-23-5
pins: 1 IN, 2 GND, 3 EN, 4 BYP, 5 OUT

## MIC7221YM5-TR
designator U?
IC COMPARATOR 1 GEN PUR SOT23-5; Manufacturer: Microchip; Manufacturer Part Number: MIC7221YM5-TR; Item Type: Comparators; Supplier: Digikey; Supplier Part Number: 576-2901-1-ND; RoHS: Yes; Stock: 26283; Pricing: 1=0.37, 25=0.32, 100=0.3 (USD)
footprint SOT-23-5
pins: 1 OUT, 2 V+ (power), 3 IN+, 4 IN-, 5 V- (power)

## MIC29300-3.3WU-TR
designator U?
IC REG LINEAR 3.3V 3A TO263-3; Manufacturer: Microchip; Manufacturer Part Number: MIC29300-3.3WU-TR; Dropout Voltage: 370mV; Number of Regulators: 1; Supplier 1: Digi-Key; Stock 1: 1; Pricing 1: 1=3.65, 25=3.05, 100=2.77 (USD); Mount: Surface Mount; Case/Package: TO-263-4; Min Operating Temperature: -40°C; Max Operating Temperature: 125°C; Packaging: Tape and Reel; Output Voltage: 3.3V; Output Current: 3A; Lead Free: Lead Free; ComponentLink1URL: http://www.micrel.com/_PDF/mic29150.pdf?src-supplier=Future+Electronics; ComponentLink1Description: http://www.micrel.com/_PDF/mic29150.pdf?src-supplier=Future+Electronics; ComponentLink2URL: http://www.micrel.com/_PDF/mic29150.pdf?src-supplier=Digi-Key; ComponentLink2Description: http://www.micrel.com/_PDF/mic29150.pdf?src-supplier=Digi-Key; Supplier Part Number 1: MIC29300-3.3WU-CT-ND; LCSC Part Number: C481370; Item Type: IC
footprint TO263-3_
pins: 1 VIN, 2 GND, 3 OUT, 4 TAB

## MIC29300-5.0WU-TR
designator U?
IC REG LINEAR 5V 3A TO263-3; Manufacturer: Microchip; Manufacturer Part Number: MIC29300-5.0WU-TR; Supplier: Arrow Electronics; LCSC Part Number: C632729; RoHS: Yes; Item Type: IC; Stock: 1421; Pricing: 1=2.862, 10=2.852, 25=2.666, 100=2.553, 250=2.542, 500=2.532, 1000=2.52 (USD); ComponentLink1URL: https://datasheet.ciiva.com/16467/mic29150-16467066.pdf?src-supplier=Future+Electronics; ComponentLink1Description: https://datasheet.ciiva.com/16467/mic29150-16467066.pdf?src-supplier=Future+Electronics; ComponentLink2URL: https://datasheet.ciiva.com/2064/mic29150-2064607.pdf?src-supplier=Digikey; ComponentLink2Description: https://datasheet.ciiva.com/2064/mic29150-2064607.pdf?src-supplier=Digikey
footprint TO-263 (DDPAK-3)
pins: 1 IN, 2 GND, 3 OUT, 4 TAB

## MIC29302WU-TR
designator U?
IC REG LDO ADJ 3A TO263-5; Manufacturer: Microchip; Manufacturer Part Number: MIC29302WU-TR; Output Voltage: 26V; Dropout Voltage: 370mV; Number of Regulators: 1; Min Input Voltage: 2.5V; Min Output Voltage: 1.25V; Max Output Voltage: 25V; Output Type: Adjustable; Output Configuration: Positive; Input Bias Current: 40nA; Reference Voltage: 1.24V; Quiescent Current: 35mA; Accuracy: 1%; Supplier 1: Future Electronics; RoHS: Yes; Category: Voltage Regulators - Linear; Pricing 1: 750=2.12000, 1500=2.09000, 2250=2.07000, 3000=2.06000, 3750=2.02000 (USD); Mount: Surface Mount; Case/Package: TO-263; Number of Pins: 5; Min Operating Temperature: -40°C; Max Operating Temperature: 125°C; Packaging: Tape and Reel; Package Quantity: 750; Series: -; Output Current: 3A; Max Input Voltage: 26V; Polarity: Positive; Number of Outputs: 1; Max Output Current: 3A; Length: 10.67mm; Width: 9.17mm; Height: 4.59mm; Radiation Hardening: No; Reach SVHC Compliant: Yes; RoHS Compliant: Yes; Lead Free: Lead Free; ComponentLink1URL: https://datasheet.ciiva.com/23772/1572633-23772885.pdf?src-supplier=Newark; ComponentLink1Description: https://datasheet.ciiva.com/23772/1572633-23772885.pdf?src-supplier=Newark; ComponentLink2URL: https://datasheet.ciiva.com/16296/mic29150-16296190.pdf?src-supplier=Future+Electronics; ComponentLink2Description: https://datasheet.ciiva.com/16296/mic29150-16296190.pdf?src-supplier=Future+Electronics; ComponentLink3URL: https://datasheet.ciiva.com/15200/getdatasheetpartid-143209-15200663.pdf?src-supplier=Verical; ComponentLink3Description: https://datasheet.ciiva.com/15200/getdatasheetpartid-143209-15200663.pdf?src-supplier=Verical; Supplier Part Number 1: 3153683; LCSC Part Number: C11149; Item Type: IC
footprint TO-263-5 (D2PAK)
pins: 1 EN, 2 IN, 3 GND, 4 OUT, 5 ADJ, 6 GND

## MIC39301S-5.0/TR
designator U?
3A Fixed 5V 16V TO-263-5 Linear Voltage Regulators (LDO) ROHS; Manufacturer: HGSEMI; Manufacturer Part Number: MIC39301S-5.0/TR; Item Type: IC; Package: TO-263-5; LCSC Part Number: C356714; ComponentLink1Description: LCSC; ComponentLink1URL: https://www.lcsc.com/product-detail/Linear-Voltage-Regulators-LDO_HGSEMI-MIC39301S-5-0-TR_C356714.html
footprint TO-263-5 (D2PAK)
pins: 1 EN, 2 IN, 3 GND, 4 OUT, 5 Flg/ADJ, 6 TAB

## MP2144GJ-Z
designator U?
IC REG BUCK ADJ 2A TSOT23-8; Manufacturer: Monolithic Power Systems; Manufacturer Part Number: MP2144GJ-Z; Number of Outputs: 1; Min Input Voltage: 2.5V; Max Supply Voltage: 5.5V; Min Output Voltage: 600mV; Max Output Voltage: 5V; Switching Frequency: 1.2MHz; Synchronous Rectifier: Yes; Output Type: Adjustable; Output Configuration: Positive; Supplier: Future Electronics; Supplier Part Number: 6045695; RoHS: Yes; Category: Voltage Regulators - Switching; Stock: 30000; Pricing: 3000=0.815, 6000=0.795, 9000=0.785, 12000=0.775 (USD); Mounting Technology: Surface Mount; Case/Package: SOT-23-8; Min Operating Temperature: -40°C; Max Operating Temperature: 125°C; Packaging: Tape and Reel; Package Quantity: 3000; Output Current: 2A; Series: -; Lead Free: Lead Free; RoHS Compliant: Yes; ComponentLink1URL: http://www.mouser.com/ds/2/277/MP2144_r1.03-371733.pdf?src-supplier=Mouser; ComponentLink1Description: http://www.mouser.com/ds/2/277/MP2144_r1.03-371733.pdf?src-supplier=Mouser; ComponentLink2URL: https://www.monolithicpower.com/pub/media/document/MP2144_r1.03.pdf?src-supplier=Digi-Key; ComponentLink2Description: https://www.monolithicpower.com/pub/media/document/MP2144_r1.03.pdf?src-supplier=Digi-Key; ComponentLink3URL: http://www.monolithicpower.com/DesktopModules/DocumentManage/API/Document/getDocument?id=522&src-supplier=Digi-Key; ComponentLink3Description: http://www.monolithicpower.com/DesktopModules/DocumentManage/API/Document/getDocument?id=522&src-supplier=Digi-Key; Item Type: IC
footprint TSOT-23-8_
pins: 1 PG, 2 VIN, 3 SW, 4 PGND, 5 OUT, 6 AGND, 7 FB, 8 EN

## MP2159GJ-Z
designator U?
IC REG BUCK ADJ 1A TSOT23-8; Manufacturer: Monolithic Power Systems; Manufacturer Part Number: MP2159GJ-Z; Supplier: Future Electronics; Supplier Part Number: 2045696; RoHS: Yes; Category: Voltage Regulators - Switching; Stock: 9000; Pricing: 3000=0.69, 6000=0.675, 9000=0.665, 12000=0.66, 15000=0.645 (USD); ComponentLink1URL: http://www.mouser.com/ds/2/277/MP2159_r1.04-371678.pdf?src-supplier=Mouser; ComponentLink1Description: http://www.mouser.com/ds/2/277/MP2159_r1.04-371678.pdf?src-supplier=Mouser; ComponentLink2URL: http://www.monolithicpower.com/DesktopModules/DocumentManage/API/Document/getDocument?id=530&src-supplier=Digi-Key; ComponentLink2Description: http://www.monolithicpower.com/DesktopModules/DocumentManage/API/Document/getDocument?id=530&src-supplier=Digi-Key; ComponentLink3URL: https://www.monolithicpower.com/pub/media/document/MP2159_r1.04.pdf?src-supplier=Digi-Key; ComponentLink3Description: https://www.monolithicpower.com/pub/media/document/MP2159_r1.04.pdf?src-supplier=Digi-Key; ComponentLink4URL: https://datasheet.octopart.com/MP2159GJ-Z-Monolithic-Power-Systems-datasheet-158618333.pdf?src-supplier=Monolithic+Power+Systems; ComponentLink4Description: https://datasheet.octopart.com/MP2159GJ-Z-Monolithic-Power-Systems-datasheet-158618333.pdf?src-supplier=Monolithic+Power+Systems; ComponentLink5URL: https://datasheet.octopart.com/MP2159GJ-Z-Monolithic-Power-Systems-datasheet-109779394.pdf?src-supplier=SHENGYU+ELECTRONICS; ComponentLink5Description: https://datasheet.octopart.com/MP2159GJ-Z-Monolithic-Power-Systems-datasheet-109779394.pdf?src-supplier=SHENGYU+ELECTRONICS; Item Type: IC
footprint TSOT-23-8_
pins: 1 PG, 2 VIN, 3 SW, 4 PGND, 5 OUT, 6 AGND, 7 FB, 8 EN

## MP2315GJ-Z
designator U?
IC REG BUCK ADJ 3A TSOT23-8; Manufacturer: Monolithic Power Systems; Manufacturer Part Number: MP2315GJ-Z; Switching Frequency: 500kHz; Number of Outputs: 1; Output Voltage: 22.8V; Min Input Voltage: 4.5V; Max Input Voltage: 24V; Min Output Voltage: 800mV; Synchronous Rectifier: Yes; Output Type: Adjustable; Output Configuration: Positive; Supplier 1: Mouser; RoHS: Yes; Category: Voltage Regulators - Switching; Stock 1: 517; Pricing 1: 1=2.68000, 10=2.42000, 50=2.28000, 100=1.95000, 1000=1.33000, 10000=1.24000 (USD); Mount: Surface Mount; Case/Package: SOT-23-8; Number of Pins: 8; Contact Plating: Tin,Matte; Min Operating Temperature: -40°C; Max Operating Temperature: 125°C; Max Output Current: 3A; Packaging: Tape and Reel; Max Output Voltage: 22.8V; Output Current: 3A; Operating Supply Voltage: 24V; Radiation Hardening: No; Lead Free: Lead Free; RoHS Compliant: Yes; ComponentLink1URL: https://www.monolithicpower.com/pub/media/document/MP2315_r1.01.pdf?src-supplier=Digi-Key; ComponentLink1Description: https://www.monolithicpower.com/pub/media/document/MP2315_r1.01.pdf?src-supplier=Digi-Key; ComponentLink2URL: http://www.monolithicpower.com/Lists/Product_Synchronous%20Switcher_5717/DispForm.aspx?ID=235&src-supplier=Avnet; ComponentLink2Description: http://www.monolithicpower.com/Lists/Product_Synchronous%20Switcher_5717/DispForm.aspx?ID=235&src-supplier=Avnet; ComponentLink3URL: http://www.monolithicpower.com/DesktopModules/DocumentManage/API/Document/getDocument?id=595&src-supplier=Digi-Key; ComponentLink3Description: http://www.monolithicpower.com/DesktopModules/DocumentManage/API/Document/getDocument?id=595&src-supplier=Digi-Key; Supplier Part Number 1: 946-MP2315GJZ; Item Type: IC
footprint TSOT-23-8_
pins: 1 AAM, 2 IN, 3 SW, 4 GND, 5 BST, 6 EN/SYNC, 7 VCC, 8 FB

## MP8759GD-Z
designator U?
IC REG BUCK ADJUSTABLE 8A 12QFN; Manufacturer: Monolithic Power Systems; Manufacturer Part Number: MP8759GD-Z; Output Voltage: 600mV; Number of Outputs: 1; Max Input Voltage: 26V; Switching Frequency: 700kHz; Min Input Voltage: 4.5V; Max Output Current: 10A; Supplier 1: Digi-Key; RoHS: Yes; Category: Voltage Regulators - Switching; Stock 1: 100; Pricing 1: 1=2.85000, 10=2.55600, 25=2.41160, 100=2.05460, 250=1.92920, 500=1.68804, 1000=1.39867, 2500=1.36500 (USD); Mount: Surface Mount; Case/Package: QFN; Number of Pins: 14; Contact Plating: Tin,Matte; Min Operating Temperature: -40°C; Max Operating Temperature: 125°C; Operating Supply Voltage: 26V; Output Type: Adjustable; RoHS Compliant: Yes; ComponentLink1URL: https://www.monolithicpower.com/pub/media/document/MP8759_r1.1.pdf?src-supplier=Digi-Key; ComponentLink1Description: https://www.monolithicpower.com/pub/media/document/MP8759_r1.1.pdf?src-supplier=Digi-Key; Supplier Part Number 1: 1589-1736-1-ND; LCSC Part Number: *; Item Type: IC
footprint 12-QFN (2x3)_
pins: 1 VIN, 2 PGND, 3 PG, 4 NC, 5 VOUT, 6 MODE, 7 SW, 8 BST, 9 VCC, 10 AGND, 11 FB, 12 EN

## MT3540
designator U?
boost converterType 28V 2.5V~5.5V 1.5A SOT-23-5 DC-DC Converters ROHS; Manufacturer: XI'AN Aerosemi Tech; Manufacturer Part Number: MT3540; Item Type: IC; Package: SOT-23-5; LCSC Part Number: C181744; ComponentLink1Description: LCSC; ComponentLink1URL: https://www.lcsc.com/product-detail/DC-DC-Converters_XI-AN-Aerosemi-Tech-MT3540_C181744.html
footprint SOT-23-5
pins: 1 SW, 2 GND, 3 FB, 4 EN, 5 VIN

## MT3608
designator U?
boost converterType 1 Boost 28V 2V~24V 1.2MHz SOT-23-6 DC-DC Converters ROHS; Manufacturer: XI'AN Aerosemi Tech; Manufacturer Part Number: MT3608; Item Type: IC; Package: SOT-23-6; LCSC Part Number: C84817; ComponentLink1Description: LCSC; ComponentLink1URL: https://www.lcsc.com/product-detail/DC-DC-Converters_XI-AN-Aerosemi-Tech-MT3608_C84817.html
footprint SOT-23-6
pins: 1 SW, 2 GND, 3 FB, 4 EN, 5 IN, 6 NC

## NB679GD-Z
designator U?
IC REG DL BUCK/LINEAR SYNC 12QFN; Manufacturer: Monolithic Power Systems; Manufacturer Part Number: NB679GD-Z; Supplier 1: Avnet; RoHS: Yes; Category: Power Supply Modules; RoHS Compliant: Yes; ComponentLink1URL: https://www.monolithicpower.com/pub/media/document/NB679_r1.03.pdf?src-supplier=Digi-Key; ComponentLink1Description: https://www.monolithicpower.com/pub/media/document/NB679_r1.03.pdf?src-supplier=Digi-Key; Supplier Part Number 1: NB679GD-Z; Item Type: IC
footprint 12-QFN (2x3)_
pins: 1 VIN, 2 PGND, 3 PG, 4 NC, 5 VOUT, 6 LDO, 7 SW, 8 BST, 9 VCC, 10 AGND, 11 EN, 12 EN_LDO

## NB680GD-Z
designator U?
Conv DC-DC Single Step Down 4.8V to 24V 12-Pin QFN T/R; Manufacturer: Monolithic Power Systems; Manufacturer Part Number: NB680GD-Z; Supplier 1: Avnet; RoHS: Yes; Category: Power Supply Modules; RoHS Compliant: Yes; Supplier Part Number 1: NB680GD-Z
footprint 12-QFN (2x3)_
pins: 1 VIN, 2 PGND, 3 PG, 4 CLK, 5 VOUT, 6 LDO, 7 SW, 8 BST, 9 VCC, 10 AGND, 11 EN, 12 EN_CLK

## NCP114AMX180TBG
designator U?
IC REG LINEAR 1.8V 300MA 4UDFN; Manufacturer: ON Semiconductor; Manufacturer Part Number: NCP114AMX180TBG; Number of Regulators: 1; Supplier: Avnet; Supplier Part Number: NCP114AMX180TBG; RoHS: Yes; Category: Voltage Regulators - Linear; Stock: 515000; Pricing: 5939=0.06231, 6000=0.06062, 12000=0.05894, 30000=0.05726, 60000=0.05557, 300000=0.05389, 600000=0.0522 (USD); Mounting Technology: Surface Mount; Case/Package: 300; Min Operating Temperature: -40°C; Max Operating Temperature: 85°C; Packaging: Tape and Reel; Output Voltage: 1.8V; Output Current: 300mA; Min Current Limit: 300mA; Series: -; Lead Free: Lead Free; RoHS Compliant: Yes; ComponentLink1URL: http://www.mouser.com/ds/2/308/NCP114-D-465957.pdf?src-supplier=Mouser; ComponentLink1Description: http://www.mouser.com/ds/2/308/NCP114-D-465957.pdf?src-supplier=Mouser; ComponentLink2URL: https://datasheet.octopart.com/NCP114AMX180TBG-ON-Semiconductor-datasheet-138898170.pdf?src-supplier=Newark; ComponentLink2Description: https://datasheet.octopart.com/NCP114AMX180TBG-ON-Semiconductor-datasheet-138898170.pdf?src-supplier=Newark; ComponentLink3URL: https://datasheet.octopart.com/NCP114AMX180TBG-ON-Semiconductor-datasheet-37176940.pdf?src-supplier=Future+Electronics; ComponentLink3Description: https://datasheet.octopart.com/NCP114AMX180TBG-ON-Semiconductor-datasheet-37176940.pdf?src-supplier=Future+Electronics; ComponentLink4URL: http://www.onsemi.com/pub/Collateral/NCP114-D.PDF?src-supplier=Digi-Key; ComponentLink4Description: http://www.onsemi.com/pub/Collateral/NCP114-D.PDF?src-supplier=Digi-Key; ComponentLink5URL: https://datasheet.octopart.com/NCP114AMX180TBG-onsemi-datasheet-66421349.pdf?src-supplier=SHENGYU+ELECTRONICS; ComponentLink5Description: https://datasheet.octopart.com/NCP114AMX180TBG-onsemi-datasheet-66421349.pdf?src-supplier=SHENGYU+ELECTRONICS; LCSC Part Number: C457784; Item Type: IC
footprint 4-UDFN (1.0x1.0)
pins: 1 OUT, 2 GND, 3 EN, 4 IN, 5 GND

## NCP114BMX180TCG
designator U?
IC REG LINEAR 1.8V 300MA 4UDFN; Manufacturer: ON Semiconductor; Manufacturer Part Number: NCP114BMX180TCG; Number of Outputs: 1; Min Input Voltage: 1.7V; Max Input Voltage: 5.5V; Polarity: Positive; Quiescent Current: 95uA; Accuracy: 1%; Output Type: Fixed; Supplier 1: Digi-Key; Stock 1: 6054; Pricing 1: 1=0.43, 10=0.321, 25=0.2804, 100=0.1815, 250=0.15024, 500=0.1202, 1000=0.09216 (USD); Mount: Surface Mount; Number of Pins: 4; Min Operating Temperature: -40°C; Max Operating Temperature: 85°C; Packaging: Tape and Reel; Max Output Current: 300mA; Output Voltage: 1.8V; Output Current: 300mA; Number of Regulators: 1; Min Current Limit: 300mA; Package Quantity: 3000; Radiation Hardening: No; Lead Free: Lead Free; RoHS Compliant: Yes; ComponentLink1URL: http://www.onsemi.com/pub/Collateral/NCP114-D.PDF?src-supplier=Avnet; ComponentLink1Description: http://www.onsemi.com/pub/Collateral/NCP114-D.PDF?src-supplier=Avnet; Supplier Part Number 1: NCP114BMX180TCGOSCT-ND; LCSC Part Number: C457759; Item Type: IC
footprint 4-UDFN (1.0x1.0)
pins: 1 OUT, 2 GND, 3 EN, 4 IN, 5 GND

## NCP161BFCT180T2G
designator U?
IC REG LINEAR 1.8V 450MA 4WLCSP; Manufacturer: ON Semiconductor; Manufacturer Part Number: NCP161BFCT180T2G; Number of Outputs: 1; Min Input Voltage: 1.9V; Max Input Voltage: 5.5V; Dropout Voltage: 300mV; Polarity: Positive; Quiescent Current: 23uA; Accuracy: 2%; Output Type: Fixed; Supplier 1: Digi-Key; RoHS: Yes; Category: Voltage Regulators - Linear; Stock 1: 1173; Pricing 1: 1=0.38000, 10=0.30900, 25=0.28320, 100=0.21060, 250=0.19088, 500=0.15798, 1000=0.11849, 2500=0.10868 (USD); Mount: Surface Mount; Number of Pins: 4; Weight: 0.002413oz; Min Operating Temperature: -40°C; Max Operating Temperature: 125°C; Max Output Current: 450mA; Output Voltage: 1.8V; Packaging: Tape and Reel; Output Current: 450mA; Number of Regulators: 1; Min Current Limit: 450mA; Package Quantity: 5000; Lead Free: Lead Free; RoHS Compliant: Yes; ComponentLink1URL: http://www.mouser.com/ds/2/308/NCP161-D-466765.pdf?src-supplier=Mouser; ComponentLink1Description: http://www.mouser.com/ds/2/308/NCP161-D-466765.pdf?src-supplier=Mouser; ComponentLink2URL: https://www.onsemi.com/pub/Collateral/NCP161-D.PDF?src-supplier=Digi-Key; ComponentLink2Description: https://www.onsemi.com/pub/Collateral/NCP161-D.PDF?src-supplier=Digi-Key; ComponentLink3URL: http://www.onsemi.com/pub/Collateral/NCP161-D.PDF?src-supplier=Digi-Key; ComponentLink3Description: http://www.onsemi.com/pub/Collateral/NCP161-D.PDF?src-supplier=Digi-Key; ComponentLink4URL: http://www.onsemi.com/pub/Collateral/NCP161-D.PDF?src-supplier=Avnet; ComponentLink4Description: http://www.onsemi.com/pub/Collateral/NCP161-D.PDF?src-supplier=Avnet; Supplier Part Number 1: NCP161BFCT180T2GOSCT-ND; LCSC Part Number: C464042; Item Type: IC
footprint 4-WLCSP (0.64x0.64)
pins: A1 IN, A2 OUT, B1 EN, B2 GND

## NCP161BMX180TBG
designator U?
IC REG LINEAR 1.8V 450MA 4XDFN; Manufacturer: ON Semiconductor; Manufacturer Part Number: NCP161BMX180TBG; Supplier: Digikey; Supplier Part Number: NCP161BMX180TBGOSCT-ND; RoHS: Yes; Item Type: IC; Stock: 9231; Pricing: 1=0.4, 10=0.328, 25=0.3, 100=0.2024, 250=0.16748, 500=0.15354, 1000=0.11516, 2500=0.10818 (USD); ComponentLink1URL: http://www.farnell.com/datasheets/2236904.pdf?src-supplier=Farnell; ComponentLink1Description: http://www.farnell.com/datasheets/2236904.pdf?src-supplier=Farnell; ComponentLink2URL: http://www.mouser.com/ds/2/308/NCP161-D-466765.pdf?src-supplier=Mouser; ComponentLink2Description: http://www.mouser.com/ds/2/308/NCP161-D-466765.pdf?src-supplier=Mouser; ComponentLink3URL: http://www.onsemi.com/pub/Collateral/NCP161-D.PDF?src-supplier=Digikey; ComponentLink3Description: http://www.onsemi.com/pub/Collateral/NCP161-D.PDF?src-supplier=Digikey; ComponentLink4URL: https://www.onsemi.com/pub/Collateral/NCP161-D.PDF?src-supplier=Digikey; ComponentLink4Description: https://www.onsemi.com/pub/Collateral/NCP161-D.PDF?src-supplier=Digikey; ComponentLink5URL: http://www.farnell.com/datasheets/2236904.pdf?src-supplier=Newark; ComponentLink5Description: http://www.farnell.com/datasheets/2236904.pdf?src-supplier=Newark
footprint 4-UDFN (1.0x1.0)
pins: 1 OUT, 2 GND, 3 EN, 4 IN, 5 EPAD

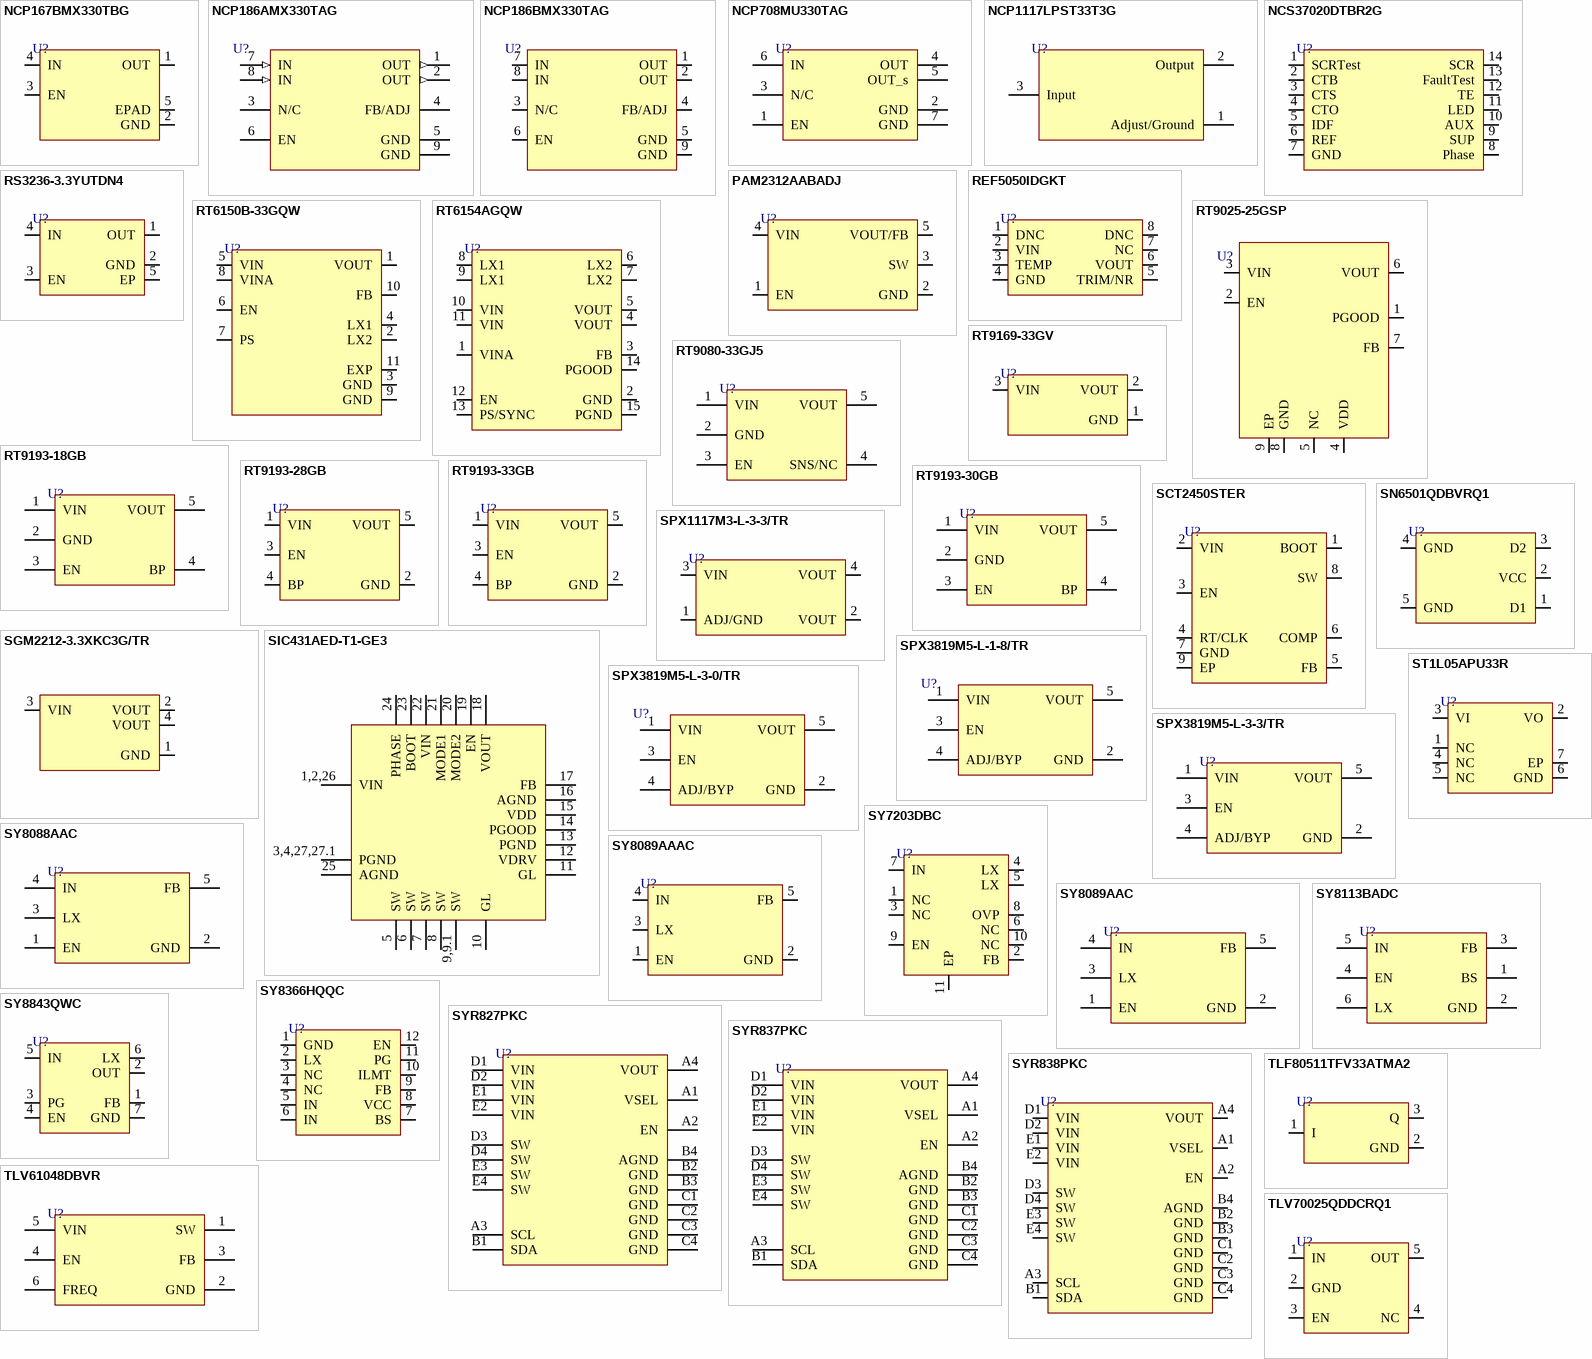
[diagram p3: symbols NCP167BMX330TBG to TLV70025QDDCRQ1]